# Altium footprint library Miscellaneous Header.PcbLib: 164 footprints (part 11 of 11)
Each footprint in its own frame and in the unit in brackets; x right, y up, seen from the top. Pads: shape width x height; smd on the part's side, far side on the other; paste and mask are expansions set on the pad; w line width, h text height; cw(c..) or ccw(c..) is an arc to the next point about the centre after c.
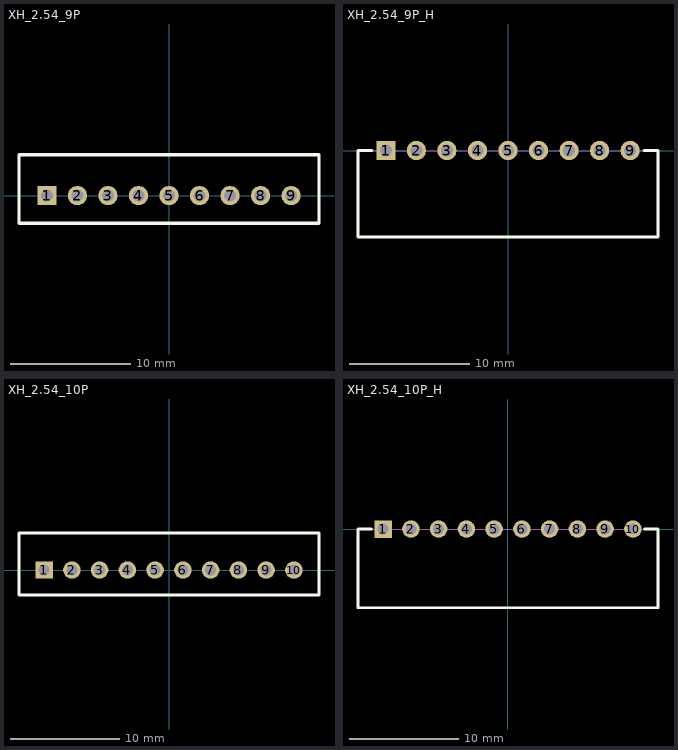
[diagram p10: the footprints below, top view; thin cyan lines are the x and y axes]

## XH_2.54_9P [mm]
pads (9):
  rect 1.6x1.6 hole 1: 1(-10.16,0)
  round 1.6 hole 1: 2(-7.62,0) 3(-5.08,0) 4(-2.54,0) 5(0,0) 6(2.54,0) 7(5.08,0) 8(7.62,0) 9(10.16,0)
Top Overlay:
  lines w0.254: -12.48,-2.3 12.48,-2.3 12.48,3.4 -12.48,3.4 -12.48,-2.3
Mechanical 15:
  lines w0.1: -12.48,-2.3 12.48,-2.3 12.48,3.4 -12.48,3.4 -12.48,-2.3
3D body: height 7, standoff -3.3, extent -12.54,-2.3 12.56,3.4

## XH_2.54_9P_H [mm]
pads (9):
  rect 1.6x1.6 hole 1: 1(-10.16,0)
  round 1.6 hole 1: 2(-7.62,0) 3(-5.08,0) 4(-2.54,0) 5(0,0) 6(2.54,0) 7(5.08,0) 8(7.62,0) 9(10.16,0)
Top Overlay:
  lines w0.254: -11.3,0 -12.48,0 -12.48,-7.2 12.48,-7.2 12.48,0 11.3,0
Mechanical 15:
  lines w0.1: -12.48,-7.2 12.48,-7.2 12.48,0 -12.48,0 -12.48,-7.2

## XH_2.54_10P [mm]
pads (10):
  rect 1.6x1.6 hole 1: 1(-11.43,0)
  round 1.6 hole 1: 2(-8.89,0) 3(-6.35,0) 4(-3.81,0) 5(-1.27,0) 6(1.27,0) 7(3.81,0) 8(6.35,0) 9(8.89,0) 10(11.43,0)
Top Overlay:
  lines w0.254: -13.73,-2.3 13.73,-2.3 13.73,3.4 -13.73,3.4 -13.73,-2.3
Mechanical 15:
  lines w0.1: -13.73,-2.3 13.73,-2.3 13.73,3.4 -13.73,3.4 -13.73,-2.3
3D body: height 7, standoff -3.3, extent -13.8,-2.3 13.8,3.4

## XH_2.54_10P_H [mm]
pads (10):
  rect 1.6x1.6 hole 1: 1(-11.43,0)
  round 1.6 hole 1: 2(-8.89,0) 3(-6.35,0) 4(-3.81,0) 5(-1.27,0) 6(1.27,0) 7(3.81,0) 8(6.35,0) 9(8.89,0) 10(11.43,0)
Top Overlay:
  lines w0.254: -12.5,0 -13.73,0 -13.73,-7.2 13.73,-7.2 13.73,0 12.5,0
Mechanical 15:
  lines w0.1: -13.73,-7.2 -13.73,0 13.73,0 13.73,-7.2 -13.73,-7.2